# Altium schematic symbol library NTIR_Integrated_IC.SchLib: 17 symbols (part 2 of 2)
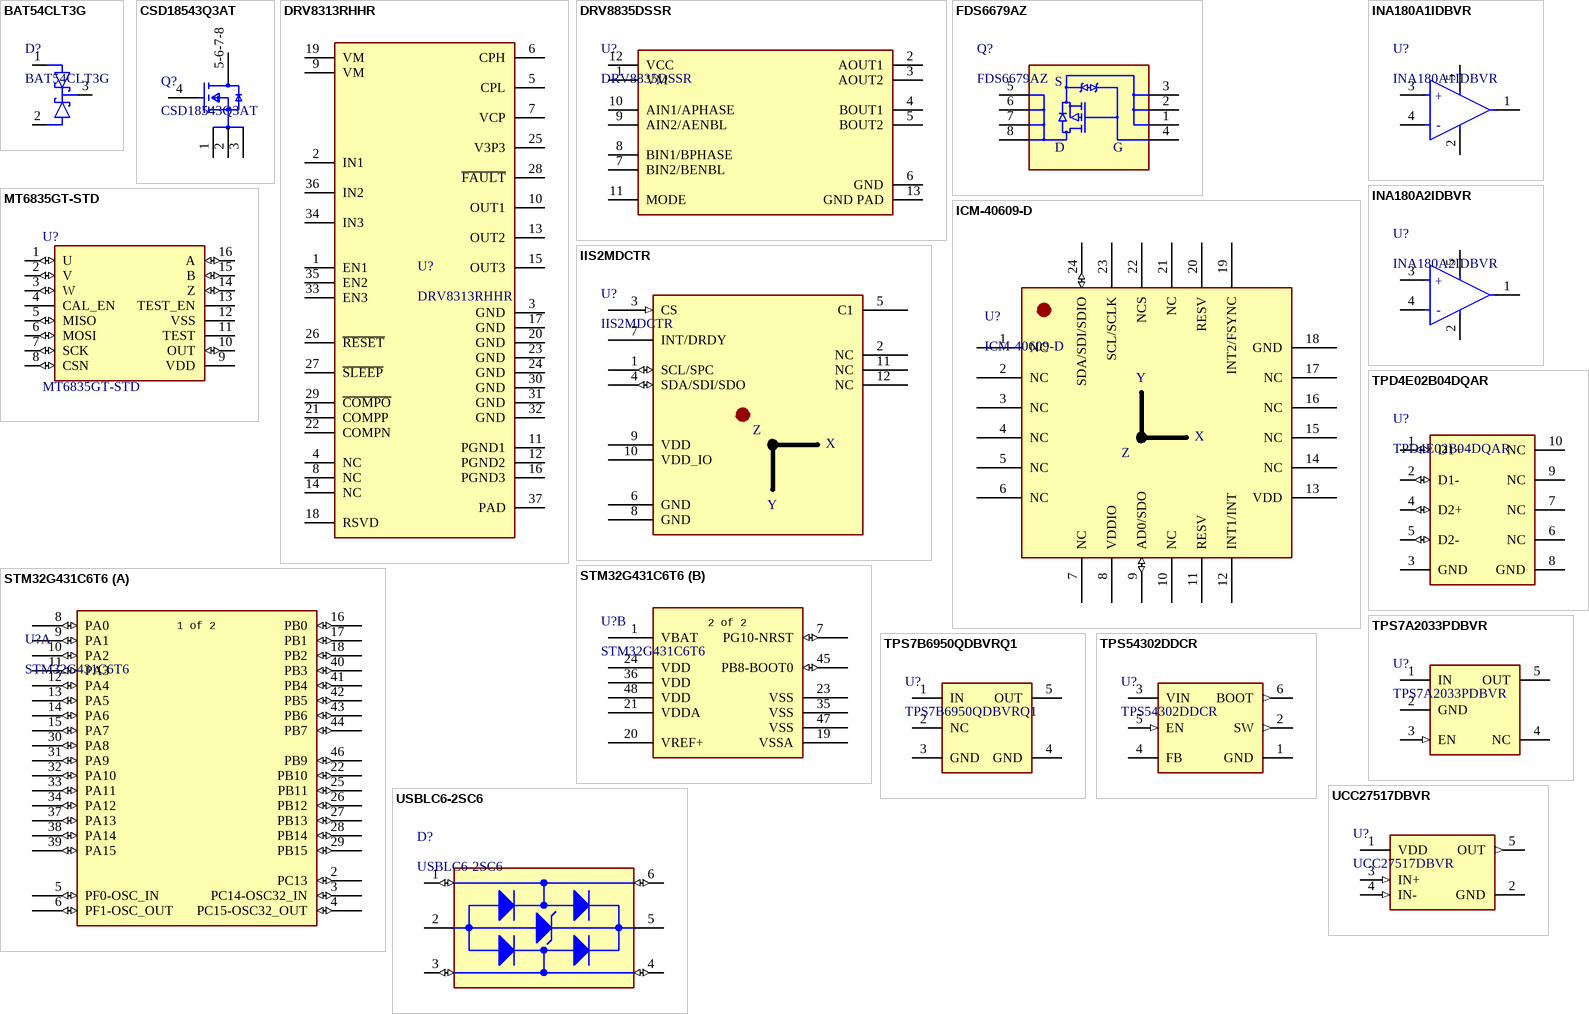
[diagram p1: symbols BAT54CLT3G to USBLC6-2SC6]

## TPD4E02B04DQAR
designator U?
Tvs Diodes & Esd Suppressors; TPD4E02B04DQAR; Texas Instruments; 3.6 V; 8.8 V; 5.5 V; 6.4 V; Manufacturer Lifecycle Status: ACTIVE; Breakdown Voltage: 6.4V; Capacitance: 250fF; Clamping Voltage: 8.8V; Direction: Bidirectional; Interface: Ethernet; Min Breakdown Voltage: 5.5V; Number of Bidirectional Channels: 4; Operating Supply Voltage: 3.6V; Peak Pulse Current: 2A; Peak Pulse Power: 17W; Power Line Protection: No; Supplier 1: DigiKey; Manufacturer: Texas Instruments; Manufacturer Part Number: TPD4E02B04DQAR; RoHS: Compliant; Category: TVS Diodes; Stock 1: 7356; Pricing 1: 1=1.11, 10=0.694, 100=0.4535, 500=0.34992, 1000=0.31655 (USD); Ambient Temperature Range High: 125°C; Composition: Zener; Height: 550µm; Lead Free: Lead Free; Length: 2.5mm; Lifecycle Status: Production; Max Operating Temperature: 125°C; Min Operating Temperature: -40°C; Mount: Surface Mount; Number of Channels: 4; Number of Pins: 10; Packaging: Cut Tape; REACH SVHC: No; Reverse Standoff Voltage: 3.6V; Schedule B: 8541100080, 8541100080|8541100080|8541100080|8541100080|8541100080; Thickness: 500µm; Width: 1mm; ComponentLink1URL: https://sigma.octopart.com:443/176143083/technical_drawing/Texas-Instruments-TPD4E02B04DQAR.pdf?src-supplier=Texas+Instruments; ComponentLink1Description: https://sigma.octopart.com:443/176143083/technical_drawing/Texas-Instruments-TPD4E02B04DQAR.pdf?src-supplier=Texas+Instruments; ComponentLink2URL: https://octopart.com:443/opatz8j6/c1?t=aoqDSauUwmHle6qTDBhf01J_x3kMb2tNsy6DVVQxBhwMOFfKV8CkZQkeAg7HStYnhO7loO6NCnDu1YOrv9Z2JQczVlylZGWUOsI57_uevt2i4KjUmUJImJtsNsM8TsbJCJLZRzl3c-JHBOFgKjYzm3f4YkU-aqx3v6cxb1C_ME88aw5ttupZPGMLTNgyHtBJBcpA7ouznK1IKJV2UmyETiVI1pi24i54odCN60WXcAZMQqZ4PrsOmgAalftpno53H2KnyzLpeqa1D7K90IVfQHoOcpwRK6PpTcRmz9oJErDp9YFCGvc7QJo0rve7mXR72TJL87rmV4JS1nvPfqc5mZqgKm5dyfH3wfm-8AMgzoYYSqgqwA0y9g-vb7wUQDN8CkBv7YuzpFQ&src-supplier=Texas+Instruments; ComponentLink2Description: https://octopart.com:443/opatz8j6/c1?t=aoqDSauUwmHle6qTDBhf01J_x3kMb2tNsy6DVVQxBhwMOFfKV8CkZQkeAg7HStYnhO7loO6NCnDu1YOrv9Z2JQczVlylZGWUOsI57_uevt2i4KjUmUJImJtsNsM8TsbJCJLZRzl3c-JHBOFgKjYzm3f4YkU-aqx3v6cxb1C_ME88aw5ttupZPGMLTNgyHtBJBcpA7ouznK1IKJV2UmyETiVI1pi24i54odCN60WXcAZMQqZ4PrsOmgAalftpno53H2KnyzLpeqa1D7K90IVfQHoOcpwRK6PpTcRmz9oJErDp9YFCGvc7QJo0rve7mXR72TJL87rmV4JS1nvPfqc5mZqgKm5dyfH3wfm-8AMgzoYYSqgqwA0y9g-vb7wUQDN8CkBv7YuzpFQ&src-supplier=Texas+Instruments; ComponentLink3URL: https://datasheet.octopart.com:443/TPD4E02B04DQAR-Texas-Instruments-datasheet-59814757.pdf?src-supplier=Texas+Instruments; ComponentLink3Description: https://datasheet.octopart.com:443/TPD4E02B04DQAR-Texas-Instruments-datasheet-59814757.pdf?src-supplier=Texas+Instruments; ComponentLink4URL: https://sigma.octopart.com:443/49262242/technical_drawing/Texas-Instruments-TPD4E02B04DQAR.pdf?src-supplier=Texas+Instruments; ComponentLink4Description: https://sigma.octopart.com:443/49262242/technical_drawing/Texas-Instruments-TPD4E02B04DQAR.pdf?src-supplier=Texas+Instruments; ComponentLink5URL: https://datasheet.octopart.com:443/TPD4E02B04DQAR-Texas-Instruments-datasheet-95279696.pdf?src-supplier=Upverter; ComponentLink5Description: https://datasheet.octopart.com:443/TPD4E02B04DQAR-Texas-Instruments-datasheet-95279696.pdf?src-supplier=Upverter; ComponentLink6URL: https://datasheet.octopart.com:443/TPD4E02B04DQAR-Texas-Instruments-datasheet-66617599.pdf?src-supplier=element14+APAC; ComponentLink6Description: https://datasheet.octopart.com:443/TPD4E02B04DQAR-Texas-Instruments-datasheet-66617599.pdf?src-supplier=element14+APAC; ComponentLink7URL: https://datasheet.octopart.com:443/TPD4E02B04DQAR-Texas-Instruments-datasheet-62283090.pdf?src-supplier=Newark; ComponentLink7Description: https://datasheet.octopart.com:443/TPD4E02B04DQAR-Texas-Instruments-datasheet-62283090.pdf?src-supplier=Newark; ComponentLink8URL: https://datasheet.octopart.com:443/TPD4E02B04DQAR-Texas-Instruments-datasheet-164419877.pdf?src-supplier=Augswan; ComponentLink8Description: https://datasheet.octopart.com:443/TPD4E02B04DQAR-Texas-Instruments-datasheet-164419877.pdf?src-supplier=Augswan; ComponentLink9URL: https://datasheet.octopart.com:443/TPD4E02B04DQAR-Texas-Instruments-datasheet-159117911.pdf?src-supplier=LCSC; ComponentLink9Description: https://datasheet.octopart.com:443/TPD4E02B04DQAR-Texas-Instruments-datasheet-159117911.pdf?src-supplier=LCSC; ComponentLink10URL: https://datasheet.octopart.com:443/TPD4E02B04DQAR-Texas-Instruments-datasheet-164847889.pdf?src-supplier=Arrow.cn; ComponentLink10Description: https://datasheet.octopart.com:443/TPD4E02B04DQAR-Texas-Instruments-datasheet-164847889.pdf?src-supplier=Arrow.cn; ComponentLink11URL: https://datasheet.octopart.com:443/TPD4E02B04DQAR-Texas-Instruments-datasheet-137316104.pdf?src-supplier=Future+Electronics; ComponentLink11Description: https://datasheet.octopart.com:443/TPD4E02B04DQAR-Texas-Instruments-datasheet-137316104.pdf?src-supplier=Future+Electronics; ComponentLink12URL: http://sigma.octopart.com:80/reach_statement/Texas-Instruments-company-64.pdf?src-supplier=Compliance+Statements; ComponentLink12Description: http://sigma.octopart.com:80/reach_statement/Texas-Instruments-company-64.pdf?src-supplier=Compliance+Statements; ComponentLink13URL: http://sigma.octopart.com:80/conflict_mineral_statement/Texas-Instruments-company-63.pdf?src-supplier=Compliance+Statements; ComponentLink13Description: http://sigma.octopart.com:80/conflict_mineral_statement/Texas-Instruments-company-63.pdf?src-supplier=Compliance+Statements; Supplier Part Number 1: 296-43875-1-ND
footprint FP-DQA0010A-MFG
pins: 1 D1+ (io), 2 D1- (io), 3 GND (power), 4 D2+ (io), 5 D2- (io), 6 NC, 7 NC, 8 GND (power), 9 NC, 10 NC

## TPS7A2033PDBVR
designator U?
300mA ultra-low-noise low-IQ low-dropout (LDO) linear regulator with high PSRR 5-SOT-23 -40 to 125; Manufacturer: Texas Instruments; Manufacturer Lifecycle Status: ACTIVE; Accuracy: 1.5%; Dropout Voltage: 145mV; Max Junction Temperature (Tj): 125°C; Max Supply Voltage: 6V; Min Supply Voltage: 1.6V; Nominal Supply Current: 6.5µA; Number of Channels: 1; Output Voltage: 3.3V; Supplier 1: DigiKey; Manufacturer Part Number: TPS7A2033PDBVR; RoHS: Compliant; Category: LDO Voltage Regulators; Stock 1: 57995; Pricing 1: 1=0.33, 10=0.225, 25=0.1992, 100=0.1715, 250=0.15828, 500=0.15028, 1000=0.14369 (USD); Case/Package: SOT-23-5; Height: 1.45mm; Length: 2.9mm; Lifecycle Status: Production; Max Operating Temperature: 125°C; Min Operating Temperature: -40°C; Number of Outputs: 1; Number of Pins: 5; Output Current: 300mA; Thickness: 1.2mm; Width: 1.6mm; ComponentLink1URL: https://sigma.octopart.com:443/177332311/technical_drawing/Texas-Instruments-TPS7A2033PDBVR.pdf?src-supplier=Texas+Instruments; ComponentLink1Description: https://sigma.octopart.com:443/177332311/technical_drawing/Texas-Instruments-TPS7A2033PDBVR.pdf?src-supplier=Texas+Instruments; ComponentLink2URL: https://octopart.com:443/opatz8j6/c1?t=jI4MJxUHNHWPLUTUjPFE_I4nFT9ogQQS70wFg6iEODFO8LbYHvqBDKPBMlDtEwO4fNGI88ubVwCkCjf0m79oYyvw0lNgXSr_kQlB_nshs-lDL0gpQEt062WpfwVbrY7aMcaNfk_VYcVu1c5ZyMHT8tYLznoJcMs0V3cIKOpV8FkTUbmZxBhaArT7MSQXB5rB175PQ9HeqkODOBcAb5uxQ4pXmdIRVFW0nHjT5bbTxbLCkHYQ6wSbjOTmjpzrmMdRq376bhW5SzS0L0ZYTijf2l1mplZ7KrrI9CUmQvcyMNcVPe6befGlNnr1fDH3Q5Ss6aSm6FD-UpaqOnEuIpR4XaVo6xK0ksEziWk1rzqOuekfSo_fNioOtoDqTgyhaxobMR58zb0N&src-supplier=Texas+Instruments; ComponentLink2Description: https://octopart.com:443/opatz8j6/c1?t=jI4MJxUHNHWPLUTUjPFE_I4nFT9ogQQS70wFg6iEODFO8LbYHvqBDKPBMlDtEwO4fNGI88ubVwCkCjf0m79oYyvw0lNgXSr_kQlB_nshs-lDL0gpQEt062WpfwVbrY7aMcaNfk_VYcVu1c5ZyMHT8tYLznoJcMs0V3cIKOpV8FkTUbmZxBhaArT7MSQXB5rB175PQ9HeqkODOBcAb5uxQ4pXmdIRVFW0nHjT5bbTxbLCkHYQ6wSbjOTmjpzrmMdRq376bhW5SzS0L0ZYTijf2l1mplZ7KrrI9CUmQvcyMNcVPe6befGlNnr1fDH3Q5Ss6aSm6FD-UpaqOnEuIpR4XaVo6xK0ksEziWk1rzqOuekfSo_fNioOtoDqTgyhaxobMR58zb0N&src-supplier=Texas+Instruments; ComponentLink3URL: https://sigma.octopart.com:443/175570406/technical_drawing/Texas-Instruments-TPS7A2033PDBVR.pdf?src-supplier=Texas+Instruments; ComponentLink3Description: https://sigma.octopart.com:443/175570406/technical_drawing/Texas-Instruments-TPS7A2033PDBVR.pdf?src-supplier=Texas+Instruments; ComponentLink4URL: https://sigma.octopart.com:443/169406034/technical_drawing/Texas-Instruments-TPS7A2033PDBVR.pdf?src-supplier=Texas+Instruments; ComponentLink4Description: https://sigma.octopart.com:443/169406034/technical_drawing/Texas-Instruments-TPS7A2033PDBVR.pdf?src-supplier=Texas+Instruments; ComponentLink5URL: https://sigma.octopart.com:443/155939316/technical_drawing/Texas-Instruments-TPS7A2033PDBVR.pdf?src-supplier=Texas+Instruments; ComponentLink5Description: https://sigma.octopart.com:443/155939316/technical_drawing/Texas-Instruments-TPS7A2033PDBVR.pdf?src-supplier=Texas+Instruments; ComponentLink6URL: https://datasheet.octopart.com:443/TPS7A2033PDBVR-Texas-Instruments-datasheet-149070019.pdf?src-supplier=Upverter; ComponentLink6Description: https://datasheet.octopart.com:443/TPS7A2033PDBVR-Texas-Instruments-datasheet-149070019.pdf?src-supplier=Upverter; ComponentLink7URL: https://datasheet.octopart.com:443/TPS7A2033PDBVR-Texas-Instruments-datasheet-164420832.pdf?src-supplier=Augswan; ComponentLink7Description: https://datasheet.octopart.com:443/TPS7A2033PDBVR-Texas-Instruments-datasheet-164420832.pdf?src-supplier=Augswan; ComponentLink8URL: https://datasheet.octopart.com:443/TPS7A2033PDBVR-Texas-Instruments-datasheet-159781690.pdf?src-supplier=LCSC; ComponentLink8Description: https://datasheet.octopart.com:443/TPS7A2033PDBVR-Texas-Instruments-datasheet-159781690.pdf?src-supplier=LCSC; ComponentLink9URL: http://sigma.octopart.com:80/reach_statement/Texas-Instruments-company-64.pdf?src-supplier=Compliance+Statements; ComponentLink9Description: http://sigma.octopart.com:80/reach_statement/Texas-Instruments-company-64.pdf?src-supplier=Compliance+Statements; ComponentLink10URL: http://sigma.octopart.com:80/conflict_mineral_statement/Texas-Instruments-company-63.pdf?src-supplier=Compliance+Statements; ComponentLink10Description: http://sigma.octopart.com:80/conflict_mineral_statement/Texas-Instruments-company-63.pdf?src-supplier=Compliance+Statements; Supplier Part Number 1: 296-TPS7A2033PDBVRDKR-ND
footprint FP-DBV0005A-MFG
pins: 1 IN (power), 2 GND (power), 3 EN (in), 4 NC, 5 OUT

## TPS7B6950QDBVRQ1
designator U?
Automotive 150-mA, off-battery (40-V), high-PSRR, low-IQ, low-dropout voltage regulator; Manufacturer: Texas Instruments; Manufacturer Lifecycle Status: ACTIVE; Accuracy: 3%; Dropout Voltage: 450mV; Max Input Voltage: 40V; Max Junction Temperature (Tj): 150°C; Max Output Current: 150mA; Min Input Voltage: 5.5V; Nominal Supply Current: 15µA; Number of Outputs: 1; Output Type: Fixed; Output Voltage: 5V; Polarity: Positive; Supplier 1: DigiKey; Manufacturer Part Number: TPS7B6950QDBVRQ1; RoHS: Compliant; Category: LDO Voltage Regulators; Stock 1: 19905; Pricing 1: 1=1.27, 10=0.921, 25=0.8336, 100=0.7374, 250=0.69156, 500=0.6639, 1000=0.65178 (USD); Case/Package: SOT-23; Contact Plating: Tin; Height: 1.45mm; Lead Free: Lead Free; Length: 2.9mm; Lifecycle Status: Production; Max Operating Temperature: 125°C; Max Supply Voltage: 40V; Min Current Limit: 150mA; Min Operating Temperature: -40°C; Min Supply Voltage: 5.5V; Mount: Surface Mount; Number of Pins: 5; Number of Regulators: 1; Output Current: 150mA; Packaging: Tape & Reel (TR); Quiescent Current: 15µA; Schedule B: 8542390000; Thickness: 1.2mm; Width: 1.6mm; ComponentLink1URL: https://sigma.octopart.com:443/177332311/technical_drawing/Texas-Instruments-TPS7B6950QDBVRQ1.pdf?src-supplier=Texas+Instruments; ComponentLink1Description: https://sigma.octopart.com:443/177332311/technical_drawing/Texas-Instruments-TPS7B6950QDBVRQ1.pdf?src-supplier=Texas+Instruments; ComponentLink2URL: https://octopart.com:443/opatz8j6/c1?t=yage2jQM-eTAqOBcVFGrEpuvjezUa6ihi7wNyjCuRQGtqUC6dJhCNcRNS_lbs06BocBomxr_74svrzpLGaIERn-qG342R1-BuMQCMBX6cWI06iOToy_eqFmZlCkAcbh1TwQKhIc7V99vdu45YZgRDnkCuEoUv-OSe8c6IG6sPm0a8LlvliNVrX0XJQ9rtL59yZRVpqPT28bvqIjN2DJpQsbikYiQOe84sKG-y_S5m-YDL4KUutxFj13EdM63eCzAJFShkpsQB4Ak1CAByhedHpIePjBP_5H1ppNN2DNL-Xn5Oqs9d5pwb0NkBJzqlrDnQh0A3DSCzOpBQu1JykaSbQbIIYKMbQ8MSCb4hsuaqUoK8UzUCtio1IGXHXVj44cLB37iY0Kfm-Y&src-supplier=Texas+Instruments; ComponentLink2Description: https://octopart.com:443/opatz8j6/c1?t=yage2jQM-eTAqOBcVFGrEpuvjezUa6ihi7wNyjCuRQGtqUC6dJhCNcRNS_lbs06BocBomxr_74svrzpLGaIERn-qG342R1-BuMQCMBX6cWI06iOToy_eqFmZlCkAcbh1TwQKhIc7V99vdu45YZgRDnkCuEoUv-OSe8c6IG6sPm0a8LlvliNVrX0XJQ9rtL59yZRVpqPT28bvqIjN2DJpQsbikYiQOe84sKG-y_S5m-YDL4KUutxFj13EdM63eCzAJFShkpsQB4Ak1CAByhedHpIePjBP_5H1ppNN2DNL-Xn5Oqs9d5pwb0NkBJzqlrDnQh0A3DSCzOpBQu1JykaSbQbIIYKMbQ8MSCb4hsuaqUoK8UzUCtio1IGXHXVj44cLB37iY0Kfm-Y&src-supplier=Texas+Instruments; ComponentLink3URL: https://sigma.octopart.com:443/175570406/technical_drawing/Texas-Instruments-TPS7B6950QDBVRQ1.pdf?src-supplier=Texas+Instruments; ComponentLink3Description: https://sigma.octopart.com:443/175570406/technical_drawing/Texas-Instruments-TPS7B6950QDBVRQ1.pdf?src-supplier=Texas+Instruments; ComponentLink4URL: https://sigma.octopart.com:443/169406034/technical_drawing/Texas-Instruments-TPS7B6950QDBVRQ1.pdf?src-supplier=Texas+Instruments; ComponentLink4Description: https://sigma.octopart.com:443/169406034/technical_drawing/Texas-Instruments-TPS7B6950QDBVRQ1.pdf?src-supplier=Texas+Instruments; ComponentLink5URL: https://sigma.octopart.com:443/155939316/technical_drawing/Texas-Instruments-TPS7B6950QDBVRQ1.pdf?src-supplier=Texas+Instruments; ComponentLink5Description: https://sigma.octopart.com:443/155939316/technical_drawing/Texas-Instruments-TPS7B6950QDBVRQ1.pdf?src-supplier=Texas+Instruments; ComponentLink6URL: https://sigma.octopart.com:443/102331370/technical_drawing/Texas-Instruments-TPS7B6950QDBVRQ1.pdf?src-supplier=Texas+Instruments; ComponentLink6Description: https://sigma.octopart.com:443/102331370/technical_drawing/Texas-Instruments-TPS7B6950QDBVRQ1.pdf?src-supplier=Texas+Instruments; ComponentLink7URL: https://datasheet.octopart.com:443/TPS7B6950QDBVRQ1-Texas-Instruments-datasheet-41218873.pdf?src-supplier=Texas+Instruments; ComponentLink7Description: https://datasheet.octopart.com:443/TPS7B6950QDBVRQ1-Texas-Instruments-datasheet-41218873.pdf?src-supplier=Texas+Instruments; ComponentLink8URL: https://datasheet.octopart.com:443/TPS7B6950QDBVRQ1-Texas-Instruments-datasheet-36993199.pdf?src-supplier=Texas+Instruments; ComponentLink8Description: https://datasheet.octopart.com:443/TPS7B6950QDBVRQ1-Texas-Instruments-datasheet-36993199.pdf?src-supplier=Texas+Instruments; ComponentLink9URL: https://datasheet.octopart.com:443/TPS7B6950QDBVRQ1-Texas-Instruments-datasheet-34152532.pdf?src-supplier=Texas+Instruments; ComponentLink9Description: https://datasheet.octopart.com:443/TPS7B6950QDBVRQ1-Texas-Instruments-datasheet-34152532.pdf?src-supplier=Texas+Instruments; ComponentLink10URL: https://sigma.octopart.com:443/49249325/technical_drawing/Texas-Instruments-TPS7B6950QDBVRQ1.pdf?src-supplier=Texas+Instruments; ComponentLink10Description: https://sigma.octopart.com:443/49249325/technical_drawing/Texas-Instruments-TPS7B6950QDBVRQ1.pdf?src-supplier=Texas+Instruments; ComponentLink11URL: https://datasheet.octopart.com:443/TPS7B6950QDBVRQ1-Texas-Instruments-datasheet-159118311.pdf?src-supplier=Augswan; ComponentLink11Description: https://datasheet.octopart.com:443/TPS7B6950QDBVRQ1-Texas-Instruments-datasheet-159118311.pdf?src-supplier=Augswan; ComponentLink12URL: https://datasheet.octopart.com:443/TPS7B6950QDBVRQ1-Texas-Instruments-datasheet-137316104.pdf?src-supplier=Future+Electronics; ComponentLink12Description: https://datasheet.octopart.com:443/TPS7B6950QDBVRQ1-Texas-Instruments-datasheet-137316104.pdf?src-supplier=Future+Electronics; ComponentLink13URL: http://sigma.octopart.com:80/reach_statement/Texas-Instruments-company-64.pdf?src-supplier=Compliance+Statements; ComponentLink13Description: http://sigma.octopart.com:80/reach_statement/Texas-Instruments-company-64.pdf?src-supplier=Compliance+Statements; ComponentLink14URL: http://sigma.octopart.com:80/conflict_mineral_statement/Texas-Instruments-company-63.pdf?src-supplier=Compliance+Statements; ComponentLink14Description: http://sigma.octopart.com:80/conflict_mineral_statement/Texas-Instruments-company-63.pdf?src-supplier=Compliance+Statements; Supplier Part Number 1: 296-42411-1-ND
footprint FP-DBV0005A-MFG
pins: 1 IN (power), 2 NC, 3 GND (power), 4 GND (power), 5 OUT

## TPS54302DDCR
designator U?
Switching Regulator, Current-mode, 3A, 400kHz Switching Freq-Max, BICMOS, PDSO6; Manufacturer: Texas Instruments; Manufacturer Lifecycle Status: ACTIVE; Max Duty Cycle: 100%; Max Junction Temperature (Tj): 125°C; Max Supply Voltage: 28V; Min Supply Voltage: 4.5V; Nominal Supply Current: 45µA; Number of Channels: 1; Quiescent Current: 40µA; Topology: Buck; Supplier 1: DigiKey; Manufacturer Part Number: TPS54302DDCR; RoHS: Compliant; Category: Voltage Regulators - Switching; Stock 1: 35980; Pricing 1: 1=1.33, 10=0.968, 25=0.8772, 100=0.7766, 250=0.72872, 500=0.6998, 1000=0.6885 (USD); Height: 1.1mm; Lead Free: Lead Free; Length: 2.9mm; Lifecycle Status: Production; Max Operating Temperature: 125°C; Min Operating Temperature: -40°C; Number of Outputs: 1; Number of Pins: 6; Output Current: 3A; Schedule B: 8542390000, 8542390000|8542390000|8542390000|8542390000|8542390000; Switching Frequency: 400kHz; Thickness: 870µm; Width: 1.6mm; ComponentLink1URL: https://sigma.octopart.com:443/180581133/technical_drawing/Texas-Instruments-TPS54302DDCR.pdf?src-supplier=Texas+Instruments; ComponentLink1Description: https://sigma.octopart.com:443/180581133/technical_drawing/Texas-Instruments-TPS54302DDCR.pdf?src-supplier=Texas+Instruments; ComponentLink2URL: https://octopart.com:443/opatz8j6/c1?t=3hrKdjC5ToyAwNev9WUgXP7fLiI3XbqhpG0VfzbDPSSAZ7tByZIukugiHfoJjeHi6tE0sSQJx4q15TZ30Ep_VF4sGaVcNmaNTS1CcRPJ23NtdklhtXX69lLE6eCXyBDSh2FQGkF8V6wgyYzAU7xR549gWF3951YplSfPBuDjsKMlU4p1uq8FGxqWFJAXnC69YCwQsXClrnaVmXrQJ8-rHygZXdVtVGj2paJZU4xF1eDzkmp4d11jMCVv2esxwiydvdHOo3sbo3IJfCj7UaSdX8Oo6XeacaYyC2Y_23x9MA2-2hZafefaBsGxGhoPZHMsIVA_vW3ZvqGvLF8CFPagPmt7ZJ-y2wdSXfDHYx8tfl76evmOo3D4Zr7duUb9cFcF-Zu-i_ZU&src-supplier=Texas+Instruments; ComponentLink2Description: https://octopart.com:443/opatz8j6/c1?t=3hrKdjC5ToyAwNev9WUgXP7fLiI3XbqhpG0VfzbDPSSAZ7tByZIukugiHfoJjeHi6tE0sSQJx4q15TZ30Ep_VF4sGaVcNmaNTS1CcRPJ23NtdklhtXX69lLE6eCXyBDSh2FQGkF8V6wgyYzAU7xR549gWF3951YplSfPBuDjsKMlU4p1uq8FGxqWFJAXnC69YCwQsXClrnaVmXrQJ8-rHygZXdVtVGj2paJZU4xF1eDzkmp4d11jMCVv2esxwiydvdHOo3sbo3IJfCj7UaSdX8Oo6XeacaYyC2Y_23x9MA2-2hZafefaBsGxGhoPZHMsIVA_vW3ZvqGvLF8CFPagPmt7ZJ-y2wdSXfDHYx8tfl76evmOo3D4Zr7duUb9cFcF-Zu-i_ZU&src-supplier=Texas+Instruments; ComponentLink3URL: https://sigma.octopart.com:443/179311906/technical_drawing/Texas-Instruments-TPS54302DDCR.pdf?src-supplier=Texas+Instruments; ComponentLink3Description: https://sigma.octopart.com:443/179311906/technical_drawing/Texas-Instruments-TPS54302DDCR.pdf?src-supplier=Texas+Instruments; ComponentLink4URL: https://sigma.octopart.com:443/159779760/technical_drawing/Texas-Instruments-TPS54302DDCR.pdf?src-supplier=Texas+Instruments; ComponentLink4Description: https://sigma.octopart.com:443/159779760/technical_drawing/Texas-Instruments-TPS54302DDCR.pdf?src-supplier=Texas+Instruments; ComponentLink5URL: https://sigma.octopart.com:443/149167535/technical_drawing/Texas-Instruments-TPS54302DDCR.pdf?src-supplier=Texas+Instruments; ComponentLink5Description: https://sigma.octopart.com:443/149167535/technical_drawing/Texas-Instruments-TPS54302DDCR.pdf?src-supplier=Texas+Instruments; ComponentLink6URL: https://sigma.octopart.com:443/49250152/technical_drawing/Texas-Instruments-TPS54302DDCR.pdf?src-supplier=Texas+Instruments; ComponentLink6Description: https://sigma.octopart.com:443/49250152/technical_drawing/Texas-Instruments-TPS54302DDCR.pdf?src-supplier=Texas+Instruments; ComponentLink7URL: https://datasheet.octopart.com:443/TPS54302DDCR-Texas-Instruments-datasheet-166241406.pdf?src-supplier=Augswan; ComponentLink7Description: https://datasheet.octopart.com:443/TPS54302DDCR-Texas-Instruments-datasheet-166241406.pdf?src-supplier=Augswan; ComponentLink8URL: https://datasheet.octopart.com:443/TPS54302DDCR-Texas-Instruments-datasheet-165804755.pdf?src-supplier=LCSC; ComponentLink8Description: https://datasheet.octopart.com:443/TPS54302DDCR-Texas-Instruments-datasheet-165804755.pdf?src-supplier=LCSC; ComponentLink9URL: https://datasheet.octopart.com:443/TPS54302DDCR-Texas-Instruments-datasheet-159590144.pdf?src-supplier=LCSC; ComponentLink9Description: https://datasheet.octopart.com:443/TPS54302DDCR-Texas-Instruments-datasheet-159590144.pdf?src-supplier=LCSC; ComponentLink10URL: https://datasheet.octopart.com:443/TPS54302DDCR-Texas-Instruments-datasheet-140571865.pdf?src-supplier=Arrow.cn; ComponentLink10Description: https://datasheet.octopart.com:443/TPS54302DDCR-Texas-Instruments-datasheet-140571865.pdf?src-supplier=Arrow.cn; ComponentLink11URL: https://datasheet.octopart.com:443/TPS54302DDCR-Texas-Instruments-datasheet-137316104.pdf?src-supplier=Future+Electronics; ComponentLink11Description: https://datasheet.octopart.com:443/TPS54302DDCR-Texas-Instruments-datasheet-137316104.pdf?src-supplier=Future+Electronics; ComponentLink12URL: http://sigma.octopart.com:80/reach_statement/Texas-Instruments-company-64.pdf?src-supplier=Compliance+Statements; ComponentLink12Description: http://sigma.octopart.com:80/reach_statement/Texas-Instruments-company-64.pdf?src-supplier=Compliance+Statements; ComponentLink13URL: http://sigma.octopart.com:80/conflict_mineral_statement/Texas-Instruments-company-63.pdf?src-supplier=Compliance+Statements; ComponentLink13Description: http://sigma.octopart.com:80/conflict_mineral_statement/Texas-Instruments-company-63.pdf?src-supplier=Compliance+Statements; Supplier Part Number 1: 296-46237-1-ND
footprint FP-DDC0006A-MFG
pins: 1 GND (power), 2 SW (out), 3 VIN (power), 4 FB, 5 EN (in), 6 BOOT (out)

## UCC27517DBVR
designator U?
Texas Instruments 5Pin gate driver module, 20VPower, SOT-23encapsulation; Manufacturer Lifecycle Status: ACTIVE; Channel Type: Single; Fall Time: 7ns; Max Junction Temperature (Tj): 140°C; Max Output Current: 4A; Max Supply Voltage: 18V; Min Supply Voltage: 4.5V; Number of Channels: 1; Operating Supply Voltage: 12V; Propagation Delay: 13ns; Rise Time: 8ns; Turn-On Delay Time: 30ns; Supplier 1: DigiKey; Manufacturer: Texas Instruments; Manufacturer Part Number: UCC27517DBVR; RoHS: Compliant; Category: Gate Drivers; Stock 1: 2734; Pricing 1: 1=0.98, 10=0.701, 25=0.632, 100=0.5563, 250=0.5202, 500=0.4984, 1000=0.48348 (USD); Case/Package: SOT-23; Height: 1.45mm; Lead Free: Lead Free; Length: 2.9mm; Lifecycle Status: Production; Max Operating Temperature: 140°C; Min Operating Temperature: -40°C; Mount: Surface Mount; Number of Drivers: 1; Number of Outputs: 1; Number of Pins: 5; Output Current: 4A; Radiation Hardening: No; Schedule B: 8542390000, 8542390000|8542390000|8542390000|8542390000|8542390000; Thickness: 1.2mm; Width: 1.6mm; ComponentLink1URL: https://sigma.octopart.com:443/177332311/technical_drawing/Texas-Instruments-UCC27517DBVR.pdf?src-supplier=Texas+Instruments; ComponentLink1Description: https://sigma.octopart.com:443/177332311/technical_drawing/Texas-Instruments-UCC27517DBVR.pdf?src-supplier=Texas+Instruments; ComponentLink2URL: https://octopart.com:443/opatz8j6/c1?t=QF-6TnH1_avSJoQ_0S3fiRDidLb9MxGJ4Uz9AwPT0qi1QfR0Fnj5DjTGeeHpbvHs8BjCC_ojhg6WztCpwH9uWHQg9GIa-AzAuCeOFGEbQxNialX3oAXWeuuXjgP1lL4t_JdhfZn_4ivmWfDReC5xef3gN95ASQZer4rTjIvWCu_kxVvyMyJAvfluM_if8tmkY5wKphml2G70Lzp-BMCIWPtYAxyUhprsDNZmykILQtdDZ3Gz1TmTnEk05PTX6KHGZ3jU6-36hwJXdlPG2psy-aBgnEFH6LhDn11bnNEHRcjhEfTTpqi6Xg91J0_YjKJ_VCt2sw1zN9H9homKZKSJklCc6aR8pl7O5AAZ3QjzuuNvD0DZizcwwNxx-IEAlhk7J9HyILY&src-supplier=Texas+Instruments; ComponentLink2Description: https://octopart.com:443/opatz8j6/c1?t=QF-6TnH1_avSJoQ_0S3fiRDidLb9MxGJ4Uz9AwPT0qi1QfR0Fnj5DjTGeeHpbvHs8BjCC_ojhg6WztCpwH9uWHQg9GIa-AzAuCeOFGEbQxNialX3oAXWeuuXjgP1lL4t_JdhfZn_4ivmWfDReC5xef3gN95ASQZer4rTjIvWCu_kxVvyMyJAvfluM_if8tmkY5wKphml2G70Lzp-BMCIWPtYAxyUhprsDNZmykILQtdDZ3Gz1TmTnEk05PTX6KHGZ3jU6-36hwJXdlPG2psy-aBgnEFH6LhDn11bnNEHRcjhEfTTpqi6Xg91J0_YjKJ_VCt2sw1zN9H9homKZKSJklCc6aR8pl7O5AAZ3QjzuuNvD0DZizcwwNxx-IEAlhk7J9HyILY&src-supplier=Texas+Instruments; ComponentLink3URL: https://sigma.octopart.com:443/175570406/technical_drawing/Texas-Instruments-UCC27517DBVR.pdf?src-supplier=Texas+Instruments; ComponentLink3Description: https://sigma.octopart.com:443/175570406/technical_drawing/Texas-Instruments-UCC27517DBVR.pdf?src-supplier=Texas+Instruments; ComponentLink4URL: https://sigma.octopart.com:443/169406034/technical_drawing/Texas-Instruments-UCC27517DBVR.pdf?src-supplier=Texas+Instruments; ComponentLink4Description: https://sigma.octopart.com:443/169406034/technical_drawing/Texas-Instruments-UCC27517DBVR.pdf?src-supplier=Texas+Instruments; ComponentLink5URL: https://sigma.octopart.com:443/155939316/technical_drawing/Texas-Instruments-UCC27517DBVR.pdf?src-supplier=Texas+Instruments; ComponentLink5Description: https://sigma.octopart.com:443/155939316/technical_drawing/Texas-Instruments-UCC27517DBVR.pdf?src-supplier=Texas+Instruments; ComponentLink6URL: https://sigma.octopart.com:443/102331370/technical_drawing/Texas-Instruments-UCC27517DBVR.pdf?src-supplier=Texas+Instruments; ComponentLink6Description: https://sigma.octopart.com:443/102331370/technical_drawing/Texas-Instruments-UCC27517DBVR.pdf?src-supplier=Texas+Instruments; ComponentLink7URL: https://sigma.octopart.com:443/49249325/technical_drawing/Texas-Instruments-UCC27517DBVR.pdf?src-supplier=Texas+Instruments; ComponentLink7Description: https://sigma.octopart.com:443/49249325/technical_drawing/Texas-Instruments-UCC27517DBVR.pdf?src-supplier=Texas+Instruments; ComponentLink8URL: https://datasheet.octopart.com:443/UCC27517DBVR-Texas-Instruments-datasheet-34159947.pdf?src-supplier=Texas+Instruments; ComponentLink8Description: https://datasheet.octopart.com:443/UCC27517DBVR-Texas-Instruments-datasheet-34159947.pdf?src-supplier=Texas+Instruments; ComponentLink9URL: https://datasheet.octopart.com:443/UCC27517DBVR-Texas-Instruments-datasheet-15828057.pdf?src-supplier=Texas+Instruments; ComponentLink9Description: https://datasheet.octopart.com:443/UCC27517DBVR-Texas-Instruments-datasheet-15828057.pdf?src-supplier=Texas+Instruments; ComponentLink10URL: https://datasheet.octopart.com:443/UCC27517DBVR-Texas-Instruments-datasheet-10824616.pdf?src-supplier=Texas+Instruments; ComponentLink10Description: https://datasheet.octopart.com:443/UCC27517DBVR-Texas-Instruments-datasheet-10824616.pdf?src-supplier=Texas+Instruments; ComponentLink11URL: https://datasheet.octopart.com:443/UCC27517DBVR-Texas-Instruments-datasheet-11522356.pdf?src-supplier=Newark; ComponentLink11Description: https://datasheet.octopart.com:443/UCC27517DBVR-Texas-Instruments-datasheet-11522356.pdf?src-supplier=Newark; ComponentLink12URL: https://datasheet.octopart.com:443/UCC27517DBVR-Texas-Instruments-datasheet-10899470.pdf?src-supplier=Arrow+Electronics; ComponentLink12Description: https://datasheet.octopart.com:443/UCC27517DBVR-Texas-Instruments-datasheet-10899470.pdf?src-supplier=Arrow+Electronics; ComponentLink13URL: https://datasheet.octopart.com:443/UCC27517DBVR-Texas-Instruments-datasheet-164421427.pdf?src-supplier=SHENGYU+ELECTRONICS; ComponentLink13Description: https://datasheet.octopart.com:443/UCC27517DBVR-Texas-Instruments-datasheet-164421427.pdf?src-supplier=SHENGYU+ELECTRONICS; ComponentLink14URL: https://datasheet.octopart.com:443/UCC27517DBVR-Texas-Instruments-datasheet-159118422.pdf?src-supplier=LCSC; ComponentLink14Description: https://datasheet.octopart.com:443/UCC27517DBVR-Texas-Instruments-datasheet-159118422.pdf?src-supplier=LCSC; ComponentLink15URL: https://datasheet.octopart.com:443/UCC27517DBVR-Texas-Instruments-datasheet-140572070.pdf?src-supplier=Arrow.cn; ComponentLink15Description: https://datasheet.octopart.com:443/UCC27517DBVR-Texas-Instruments-datasheet-140572070.pdf?src-supplier=Arrow.cn; ComponentLink16URL: http://sigma.octopart.com:80/reach_statement/Texas-Instruments-company-64.pdf?src-supplier=Compliance+Statements; ComponentLink16Description: http://sigma.octopart.com:80/reach_statement/Texas-Instruments-company-64.pdf?src-supplier=Compliance+Statements; ComponentLink17URL: http://sigma.octopart.com:80/conflict_mineral_statement/Texas-Instruments-company-63.pdf?src-supplier=Compliance+Statements; ComponentLink17Description: http://sigma.octopart.com:80/conflict_mineral_statement/Texas-Instruments-company-63.pdf?src-supplier=Compliance+Statements; Supplier Part Number 1: 296-39527-1-ND
footprint FP-DBV0005A-MFG
pins: 1 VDD (power), 2 GND (power), 3 IN+ (in), 4 IN- (in), 5 OUT (out)

## USBLC6-2SC6
designator D?
STMicroelectronics USBLC6-2SC6 TVS diode surge protection on full tape reel; Breakdown Voltage: 6V; Capacitance: 2.5pF; Clamping Voltage: 17V; Data Rate: 480Mbps; Direction: Unidirectional; Element Configuration: Dual; ESD Protection: Yes; Forward Voltage: 1.1V; Leakage Current: 150nA; Max Junction Temperature (Tj): 125°C; Max Repetitive Reverse Voltage (Vrrm): 5.25V; Number of Bidirectional Channels: 2; Number of Elements: 1; Peak Pulse Current: 5A; Reverse Standoff Voltage: 5V; Test Current: 1mA; Supplier 1: DigiKey; Manufacturer: STMicroelectronics; Manufacturer Part Number: USBLC6-2SC6; RoHS: Compliant; Category: TVS Diodes; Stock 1: 66064; Pricing 1: 1=0.36, 10=0.243, 100=0.163, 500=0.127, 1000=0.114 (USD); Case/Package: SOT-23; China RoHS: Compliant; Contact Plating: Tin; Depth: 1.75mm; Height: 1.45mm; Lead Free: Lead Free; Length: 3.05mm; Lifecycle Status: Production; Max Breakdown Voltage: 6V; Max Operating Temperature: 125°C; Max Reverse Leakage Current: 150nA; Min Breakdown Voltage: 6V; Min Operating Temperature: -40°C; Mount: Surface Mount; Number of Channels: 2; Number of Pins: 6; Number of Terminals: 6; Operating Supply Voltage: 1.1V; Peak Reverse Current: 150nA; Polarity: Unidirectional; Power Line Protection: Yes; Radiation Hardening: No; REACH SVHC: Yes; Reverse Breakdown Voltage: 6V; Schedule B: 8536300000, 8536300000|8536300000|8536300000|8536300000|8536300000|8536300000|8536300000|8536300000|8536300000|8536300000|8536300000|8536300000|8536300000|8536300000|8536300000|8536300000|8536300000|8536300000|8536300000|8536300000|8536300000|8536300000|8536300000|85; Termination: SMD/SMT; Width: 1.75mm; Working Voltage: 5V; ComponentLink1URL: https://datasheet.octopart.com:443/USBLC6-2SC6-STMicroelectronics-datasheet-10412581.pdf?src-supplier=Newark; ComponentLink1Description: https://datasheet.octopart.com:443/USBLC6-2SC6-STMicroelectronics-datasheet-10412581.pdf?src-supplier=Newark; ComponentLink2URL: https://datasheet.octopart.com:443/USBLC6-2SC6-STMicroelectronics-datasheet-181961833.pdf?src-supplier=Newark; ComponentLink2Description: https://datasheet.octopart.com:443/USBLC6-2SC6-STMicroelectronics-datasheet-181961833.pdf?src-supplier=Newark; ComponentLink3URL: https://datasheet.octopart.com:443/USBLC6-2SC6-STMicroelectronics-datasheet-525477.pdf?src-supplier=Factory+Futures; ComponentLink3Description: https://datasheet.octopart.com:443/USBLC6-2SC6-STMicroelectronics-datasheet-525477.pdf?src-supplier=Factory+Futures; ComponentLink4URL: https://datasheet.octopart.com:443/USBLC6-2SC6-STMicroelectronics-datasheet-82998616.pdf?src-supplier=Farnell; ComponentLink4Description: https://datasheet.octopart.com:443/USBLC6-2SC6-STMicroelectronics-datasheet-82998616.pdf?src-supplier=Farnell; ComponentLink5URL: https://datasheet.octopart.com:443/USBLC6-2SC6-STMicroelectronics-datasheet-46285.pdf?src-supplier=Farnell; ComponentLink5Description: https://datasheet.octopart.com:443/USBLC6-2SC6-STMicroelectronics-datasheet-46285.pdf?src-supplier=Farnell; ComponentLink6URL: https://datasheet.octopart.com:443/USBLC6-2SC6-STMicroelectronics-datasheet-14050643.pdf?src-supplier=iiiC; ComponentLink6Description: https://datasheet.octopart.com:443/USBLC6-2SC6-STMicroelectronics-datasheet-14050643.pdf?src-supplier=iiiC; ComponentLink7URL: https://datasheet.octopart.com:443/USBLC6-2SC6-STMicroelectronics-datasheet-10521292.pdf?src-supplier=Jameco; ComponentLink7Description: https://datasheet.octopart.com:443/USBLC6-2SC6-STMicroelectronics-datasheet-10521292.pdf?src-supplier=Jameco
footprint SOT95P280X145-6N
pins: 1 I/O1_IN (io), 2 GND (power), 3 I/O2_IN (io), 4 I/O2_OUT (io), 5 VBUS (power), 6 I/O1_OUT (io)